# Altium footprint library MY_LIB_Connectors_Amass.PcbLib: 25 footprints (part 1 of 2)
Each footprint in its own frame and in the unit in brackets; x right, y up, seen from the top. Pads: shape width x height; smd on the part's side, far side on the other; paste and mask are expansions set on the pad; w line width, h text height; cw(c..) or ccw(c..) is an arc to the next point about the centre after c.
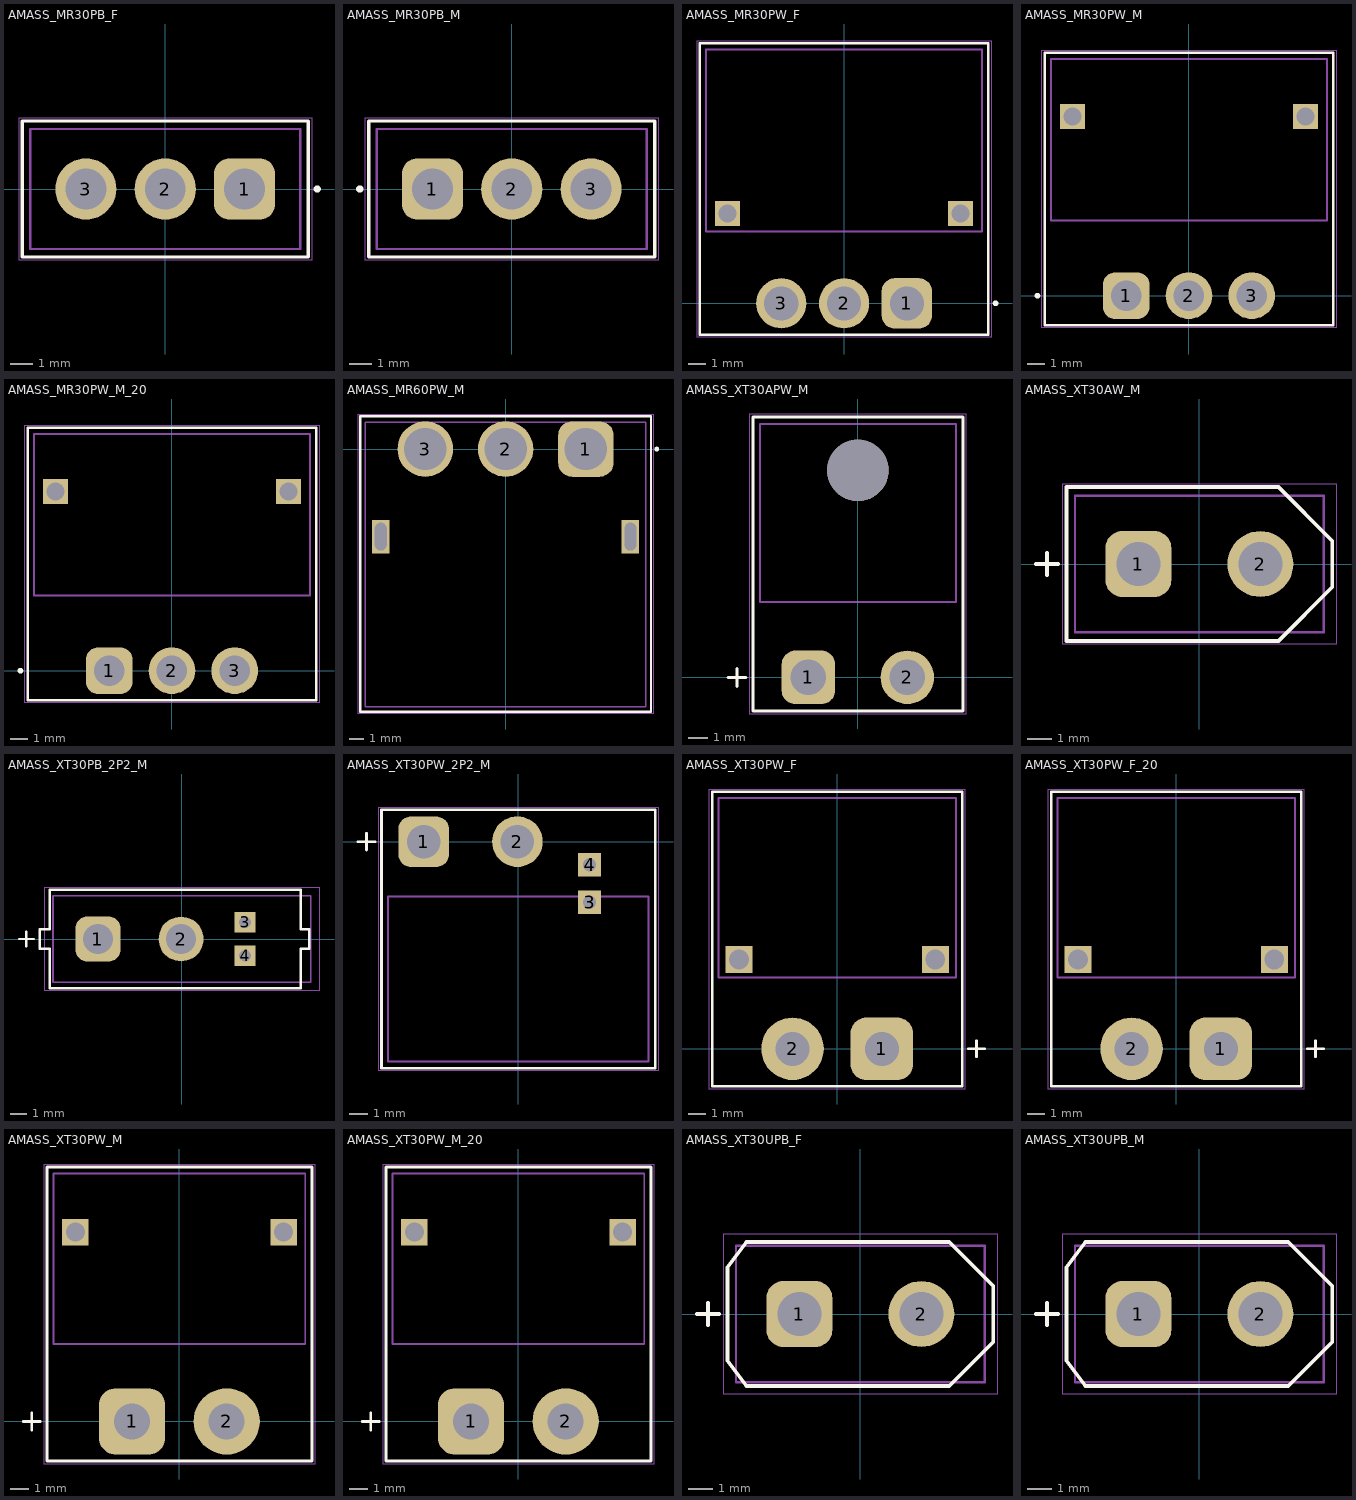
[diagram p0: the footprints below, top view; thin cyan lines are the x and y axes]

## AMASS_MR30PB_F [mm] "AMASS_MR30PB_F; AMASS board-mount connector"
height 9.4
pads (3):
  rrect50% 2.7x2.7 hole 1.8 paste+0 mask+0.05: 1(3.5,0)
  round 2.7 hole 1.8 paste+0 mask+0.05: 2(0,0) 3(-3.5,0)
Top Overlay:
  circle w0.16: c6.7,0 r0.08
  lines w0.15: -6.3,-3 6.3,-3 6.3,3 -6.3,3 -6.3,-3
Mechanical 1:
  lines w0.1: -5.95,-2.65 5.95,-2.65 5.95,2.65 -5.95,2.65 -5.95,-2.65
Mechanical 15:
  lines w0.05: -6.45,-3.15 6.45,-3.15 6.45,3.15 -6.45,3.15 -6.45,-3.15
3D body "AMASS_MR30PB_F.step": height 9.4, standoff -3, extent -5.95,-2.65 5.95,2.65

## AMASS_MR30PB_M [mm] "AMASS_MR30PB_M; AMASS board-mount connector"
height 10.4
pads (3):
  rrect50% 2.7x2.7 hole 1.8 paste+0 mask+0.05: 1(-3.5,0)
  round 2.7 hole 1.8 paste+0 mask+0.05: 2(0,0) 3(3.5,0)
Top Overlay:
  circle w0.16: c-6.7,0 r0.08
  lines w0.15: -6.3,-3 6.3,-3 6.3,3 -6.3,3 -6.3,-3
Mechanical 1:
  lines w0.1: -5.95,-2.65 5.95,-2.65 5.95,2.65 -5.95,2.65 -5.95,-2.65
Mechanical 15:
  lines w0.05: -6.45,-3.15 6.45,-3.15 6.45,3.15 -6.45,3.15 -6.45,-3.15
3D body "AMASS_MR30PB_M.step": height 10.4, standoff -3, extent -5.95,-2.65 5.95,2.65

## AMASS_MR30PW_F [mm] "AMASS_MR30PW_F; AMASS board-mount connector"
height 5.3
pads (5):
  rrect50% 2.8x2.8 hole 1.9 paste+0 mask+0.05: 1(3.5,0)
  round 2.8 hole 1.9 paste+0 mask+0.05: 2(0,0) 3(-3.5,0)
  rect 1.4x1.4 hole 1 paste+0 mask+0.05: ""(-6.5,5) ""(6.5,5)
Top Overlay:
  circle w0.16: c8.45,0 r0.08
  lines w0.15: -8.05,-1.75 8.05,-1.75 8.05,14.5 -8.05,14.5 -8.05,-1.75
Mechanical 1:
  lines w0.1: -7.7,4 7.7,4 7.7,14.15 -7.7,14.15 -7.7,4
Mechanical 15:
  lines w0.05: -8.2,-1.9 8.2,-1.9 8.2,14.65 -8.2,14.65 -8.2,-1.9
3D body "AMASS_MR30PW_F.step": height 5.3, standoff -3, extent -7.7,4 7.7,14.15

## AMASS_MR30PW_M [mm] "AMASS_MR30PW_M; AMASS board-mount connector"
height 5.3
pads (5):
  rrect50% 2.6x2.6 hole 1.7 paste+0 mask+0.05: 1(-3.5,0)
  round 2.6 hole 1.7 paste+0 mask+0.05: 2(0,0) 3(3.5,0)
  rect 1.4x1.4 hole 1 paste+0 mask+0.05: ""(-6.5,10) ""(6.5,10)
Top Overlay:
  circle w0.16: c-8.45,0 r0.08
  lines w0.15: -8.05,-1.65 8.05,-1.65 8.05,13.55 -8.05,13.55 -8.05,-1.65
Mechanical 1:
  lines w0.1: -7.7,4.2 7.7,4.2 7.7,13.2 -7.7,13.2 -7.7,4.2
Mechanical 15:
  lines w0.05: -8.2,-1.8 8.2,-1.8 8.2,13.7 -8.2,13.7 -8.2,-1.8
3D body "AMASS_MR30PW_M.step": height 4.9, standoff -3, extent -7.7,4.2 7.7,13.2

## AMASS_MR30PW_M_20 [mm] "AMASS_MR30PW_M_20; AMASS board-mount connector"
height 5.3
pads (5):
  rrect50% 2.6x2.6 hole 1.7 paste+0 mask+0.05: 1(-3.5,0)
  round 2.6 hole 1.7 paste+0 mask+0.05: 2(0,0) 3(3.5,0)
  rect 1.4x1.4 hole 1 paste+0 mask+0.05: ""(-6.5,10) ""(6.5,10)
Top Overlay:
  circle w0.16: c-8.45,0 r0.08
  lines w0.15: -8.05,-1.65 8.05,-1.65 8.05,13.55 -8.05,13.55 -8.05,-1.65
Mechanical 1:
  lines w0.1: -7.7,4.2 7.7,4.2 7.7,13.2 -7.7,13.2 -7.7,4.2
Mechanical 15:
  lines w0.05: -8.2,-1.8 8.2,-1.8 8.2,13.7 -8.2,13.7 -8.2,-1.8
3D body "AMASS_MR30PW_M_20.step": height 4.91, standoff -2, extent -7.7,4.2 7.7,13.2

## AMASS_MR60PW_M [mm] "AMASS_MR60PW_M; AMASS board-mount connector"
height 8.2
pads (5):
  rrect50% 3.8x3.8 hole 2.9 paste+0 mask+0.05: 1(5.5,0)
  round 3.8 hole 2.9 paste+0 mask+0.05: 2(0,0) 3(-5.5,0)
  rect 1.2x2.3 hole 0.8 slot 1.9 at 90 deg paste+0 mask+0.05: ""(-8.55,-6) ""(8.55,-6)
Top Overlay:
  circle w0.16: c10.35,0 r0.08
  lines w0.15: -9.95,-18 9.95,-18 9.95,2.25 -9.95,2.25 -9.95,-18
Mechanical 1:
  lines w0.1: -9.6,-17.65 9.6,-17.65 9.6,1.85 -9.6,1.85 -9.6,-17.65
Mechanical 15:
  lines w0.05: -10.1,-18.15 10.1,-18.15 10.1,2.4 -10.1,2.4 -10.1,-18.15
3D body "AMASS_MR60PW_M.step": height 8.4, standoff -3, extent -9.6,-17.65 9.6,1.85

## AMASS_XT30APW_M [mm] "AMASS_XT30APW_M; AMASS board-mount connector"
height 5.15
pads (3):
  rrect50% 2.7x2.7 hole 1.8 paste+0 mask+0.05: 1(-2.5,0)
  round 2.7 hole 1.8 paste+0 mask+0.05: 2(2.5,0)
  round 3.1 hole 3.1 unplated paste+0 mask+0.05: ""(0,10.45)
Top Overlay:
  lines w0.15: -6.55,0 -5.65,0 ; -6.1,-0.45 -6.1,0.45 ; -5.3,-1.7 5.3,-1.7 5.3,13.15 -5.3,13.15 -5.3,-1.7
Mechanical 1:
  lines w0.1: -4.95,3.8 4.95,3.8 4.95,12.8 -4.95,12.8 -4.95,3.8
Mechanical 15:
  lines w0.05: -5.45,-1.85 5.45,-1.85 5.45,13.3 -5.45,13.3 -5.45,-1.85
3D body "AMASS_XT30APW_M.step": height 5.15, standoff -3, extent -4.95,3.8 4.95,12.8

## AMASS_XT30AW_M [mm] "AMASS_XT30AW_M; AMASS board-mount connector"
height 10.7
pads (2):
  rrect50% 2.7x2.7 hole 1.8 paste+0 mask+0.05: 1(-2.5,0)
  round 2.7 hole 1.8 paste+0 mask+0.05: 2(2.5,0)
Top Overlay:
  lines w0.15: -6.7,0 -5.8,0 ; -6.25,-0.45 -6.25,0.45 ; -5.45,-3.16 3.245,-3.16 5.45,-0.944 5.45,0.944 3.245,3.16 -5.45,3.16 -5.45,-3.16
Mechanical 1:
  lines w0.1: -5.1,-2.8 5.1,-2.8 5.1,2.8 -5.1,2.8 -5.1,-2.8
Mechanical 15:
  lines w0.05: -5.6,-3.3 5.6,-3.3 5.6,3.3 -5.6,3.3 -5.6,-3.3
3D body "AMASS_XT30AW_M.step": height 10.7, standoff -3, extent -5.1,-2.8 5.1,2.8

## AMASS_XT30PB_2P2_M [mm] "AMASS_XT30PB_2P2_M; AMASS board-mount connector"
height 11.3
pads (4):
  rrect50% 2.7x2.7 hole 1.8 paste+0 mask+0.05: 1(-5.05,0)
  round 2.7 hole 1.8 paste+0 mask+0.05: 2(-0.05,0)
  rect 1.24x1.24 hole 0.7 paste+0 mask+0.05: 3(3.8,1) 4(3.8,-1)
Top Overlay:
  lines w0.15: -9.8,0 -8.9,0 ; -9.35,-0.45 -9.35,0.45 ; -8.55,-0.6 -7.95,-0.6 -7.95,-2.95 7.15,-2.95 7.15,-0.6 7.65,-0.6 7.65,0.6 7.15,0.6 7.15,2.95 -7.95,2.95 -7.95,0.6 -8.55,0.6 -8.55,-0.6
Mechanical 1:
  lines w0.1: -7.75,-2.6 7.75,-2.6 7.75,2.6 -7.75,2.6 -7.75,-2.6
Mechanical 15:
  lines w0.05: -8.25,-3.1 8.25,-3.1 8.25,3.1 -8.25,3.1 -8.25,-3.1
3D body "AMASS_XT30PB_2P2_M.step": height 8.8, standoff -2.4, extent -7.75,-2.6 7.75,2.6

## AMASS_XT30PW_2P2_M [mm] "AMASS_XT30PW_2P2_M; AMASS board-mount connector"
height 5.2
pads (4):
  rrect50% 2.7x2.7 hole 1.8 paste+0 mask+0.05: 1(-5.05,0)
  round 2.7 hole 1.8 paste+0 mask+0.05: 2(-0.05,0)
  rect 1.24x1.24 hole 0.7 paste+0 mask+0.05: 3(3.8,-3.23) 4(3.8,-1.23)
Top Overlay:
  lines w0.15: -8.55,0 -7.65,0 ; -8.1,-0.45 -8.1,0.45 ; -7.3,-12.08 7.3,-12.08 7.3,1.7 -7.3,1.7 -7.3,-12.08
Mechanical 1:
  lines w0.1: -6.95,-11.73 6.95,-11.73 6.95,-2.93 -6.95,-2.93 -6.95,-11.73
Mechanical 15:
  lines w0.05: -7.45,-12.23 7.45,-12.23 7.45,1.85 -7.45,1.85 -7.45,-12.23
3D body "AMASS_XT30PW_2P2_M.step": height 5.2, standoff -1.97, extent -6.95,-11.73 6.95,-2.93

## AMASS_XT30PW_F [mm] "AMASS_XT30PW_F; AMASS board-mount connector"
height 5.15
pads (4):
  rrect50% 3.5x3.5 hole 1.9 paste+0 mask+0.05: 1(2.5,0)
  round 3.5 hole 1.9 paste+0 mask+0.05: 2(-2.5,0)
  rect 1.5x1.5 hole 1.1 paste+0 mask+0.05: ""(-5.5,5) ""(5.5,5)
Top Overlay:
  lines w0.15: 7.35,0 8.25,0 ; 7.8,-0.45 7.8,0.45 ; -7,-2.1 7,-2.1 7,14.4 -7,14.4 -7,-2.1
Mechanical 1:
  lines w0.1: -6.65,4 6.65,4 6.65,14.05 -6.65,14.05 -6.65,4
Mechanical 15:
  lines w0.05: -7.15,-2.25 7.15,-2.25 7.15,14.55 -7.15,14.55 -7.15,-2.25
3D body "AMASS_XT30PW_F.step": height 5.15, standoff -3, extent -6.65,4 6.65,14.05

## AMASS_XT30PW_F_20 [mm] "AMASS_XT30PW_F_20; AMASS board-mount connector"
height 5.15
pads (4):
  rrect50% 3.5x3.5 hole 1.9 paste+0 mask+0.05: 1(2.5,0)
  round 3.5 hole 1.9 paste+0 mask+0.05: 2(-2.5,0)
  rect 1.5x1.5 hole 1.1 paste+0 mask+0.05: ""(-5.5,5) ""(5.5,5)
Top Overlay:
  lines w0.15: 7.35,0 8.25,0 ; 7.8,-0.45 7.8,0.45 ; -7,-2.1 7,-2.1 7,14.4 -7,14.4 -7,-2.1
Mechanical 1:
  lines w0.1: -6.65,4 6.65,4 6.65,14.05 -6.65,14.05 -6.65,4
Mechanical 15:
  lines w0.05: -7.15,-2.25 7.15,-2.25 7.15,14.55 -7.15,14.55 -7.15,-2.25
3D body "AMASS_XT30PW_F_20.step": height 5.2, standoff -2, extent -6.65,4 6.65,14.05

## AMASS_XT30PW_M [mm] "AMASS_XT30PW_M; AMASS board-mount connector"
height 5.6
pads (4):
  rrect50% 3.5x3.5 hole 1.9 paste+0 mask+0.05: 1(-2.5,0)
  round 3.5 hole 1.9 paste+0 mask+0.05: 2(2.5,0)
  rect 1.4x1.4 hole 1 paste+0 mask+0.05: ""(-5.5,10) ""(5.5,10)
Top Overlay:
  lines w0.15: -8.25,0 -7.35,0 ; -7.8,-0.45 -7.8,0.45 ; -7,-2.1 7,-2.1 7,13.45 -7,13.45 -7,-2.1
Mechanical 1:
  lines w0.1: -6.65,4.1 6.65,4.1 6.65,13.1 -6.65,13.1 -6.65,4.1
Mechanical 15:
  lines w0.05: -7.15,-2.25 7.15,-2.25 7.15,13.6 -7.15,13.6 -7.15,-2.25
3D body "AMASS_XT30PW_M.step": height 5.15, standoff -3, extent -6.65,4.1 6.65,13.1

## AMASS_XT30PW_M_20 [mm] "AMASS_XT30PW_M_20; AMASS board-mount connector"
height 5.6
pads (4):
  rrect50% 3.5x3.5 hole 1.9 paste+0 mask+0.05: 1(-2.5,0)
  round 3.5 hole 1.9 paste+0 mask+0.05: 2(2.5,0)
  rect 1.4x1.4 hole 1 paste+0 mask+0.05: ""(-5.5,10) ""(5.5,10)
Top Overlay:
  lines w0.15: -8.25,0 -7.35,0 ; -7.8,-0.45 -7.8,0.45 ; -7,-2.1 7,-2.1 7,13.45 -7,13.45 -7,-2.1
Mechanical 1:
  lines w0.1: -6.65,4.1 6.65,4.1 6.65,13.1 -6.65,13.1 -6.65,4.1
Mechanical 15:
  lines w0.05: -7.15,-2.25 7.15,-2.25 7.15,13.6 -7.15,13.6 -7.15,-2.25
3D body "AMASS_XT30PW_M_20.step": height 5, standoff -2, extent -6.65,4.1 6.65,13.1

## AMASS_XT30UPB_F [mm] "AMASS_XT30UPB_F; AMASS board-mount connector"
height 9.5
pads (2):
  rrect50% 2.7x2.7 hole 1.8 paste+0 mask+0.05: 1(-2.5,0)
  round 2.7 hole 1.8 paste+0 mask+0.05: 2(2.5,0)
Top Overlay:
  lines w0.15: -6.7,0 -5.8,0 ; -6.25,-0.45 -6.25,0.45 ; -5.45,-1.917 -4.675,-2.95 3.645,-2.95 5.45,-1.145 5.45,1.145 3.645,2.95 -4.675,2.95 -5.45,1.917 -5.45,-1.917
Mechanical 1:
  lines w0.1: -5.1,-2.8 5.1,-2.8 5.1,2.8 -5.1,2.8 -5.1,-2.8
Mechanical 15:
  lines w0.05: -5.6,-3.3 5.6,-3.3 5.6,3.3 -5.6,3.3 -5.6,-3.3
3D body "AMASS_XT30UPB_F.step": height 9.4, standoff -2, extent -5.1,-2.8 5.1,2.8

## AMASS_XT30UPB_M [mm] "AMASS_XT30UPB_M; AMASS board-mount connector"
height 10.7
pads (2):
  rrect50% 2.7x2.7 hole 1.8 paste+0 mask+0.05: 1(-2.5,0)
  round 2.7 hole 1.8 paste+0 mask+0.05: 2(2.5,0)
Top Overlay:
  lines w0.15: -6.7,0 -5.8,0 ; -6.25,-0.45 -6.25,0.45 ; -5.45,-1.917 -4.675,-2.95 3.645,-2.95 5.45,-1.145 5.45,1.145 3.645,2.95 -4.675,2.95 -5.45,1.917 -5.45,-1.917
Mechanical 1:
  lines w0.1: -5.1,-2.8 5.1,-2.8 5.1,2.8 -5.1,2.8 -5.1,-2.8
Mechanical 15:
  lines w0.05: -5.6,-3.3 5.6,-3.3 5.6,3.3 -5.6,3.3 -5.6,-3.3
3D body "AMASS_XT30UPB_M.step": height 10.7, standoff -2, extent -5.1,-2.8 5.1,2.8